# Altium schematic symbol library LM1117-3.3.SchLib: 1 symbol
Pins are listed as number, name and electrical type; pins without a type are passive.

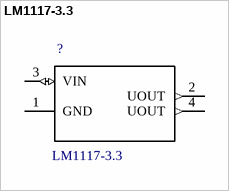
[diagram p0: symbol LM1117-3.3]

## LM1117-3.3
designator ?
MF: Texas Instruments; Package: SOT-223-4 Texas Instruments; SnapEDA_Link: https://www.snapeda.com/parts/LM1117-3.3/Texas%20Instruments/view-part/?ref=snap; Availability: Unavailable; MP: LM1117-3.3; Price: None; Value: *
footprint *SOT-223
pins: 1 GND, 2 UOUT (out), 3 VIN (io), 4 UOUT (out)